# Altium footprint library bs_libs.PcbLib: 125 footprints (part 2 of 8)
Each footprint in its own frame and in the unit in brackets; x right, y up, seen from the top. Pads: shape width x height; smd on the part's side, far side on the other; paste and mask are expansions set on the pad; w line width, h text height; cw(c..) or ccw(c..) is an arc to the next point about the centre after c.
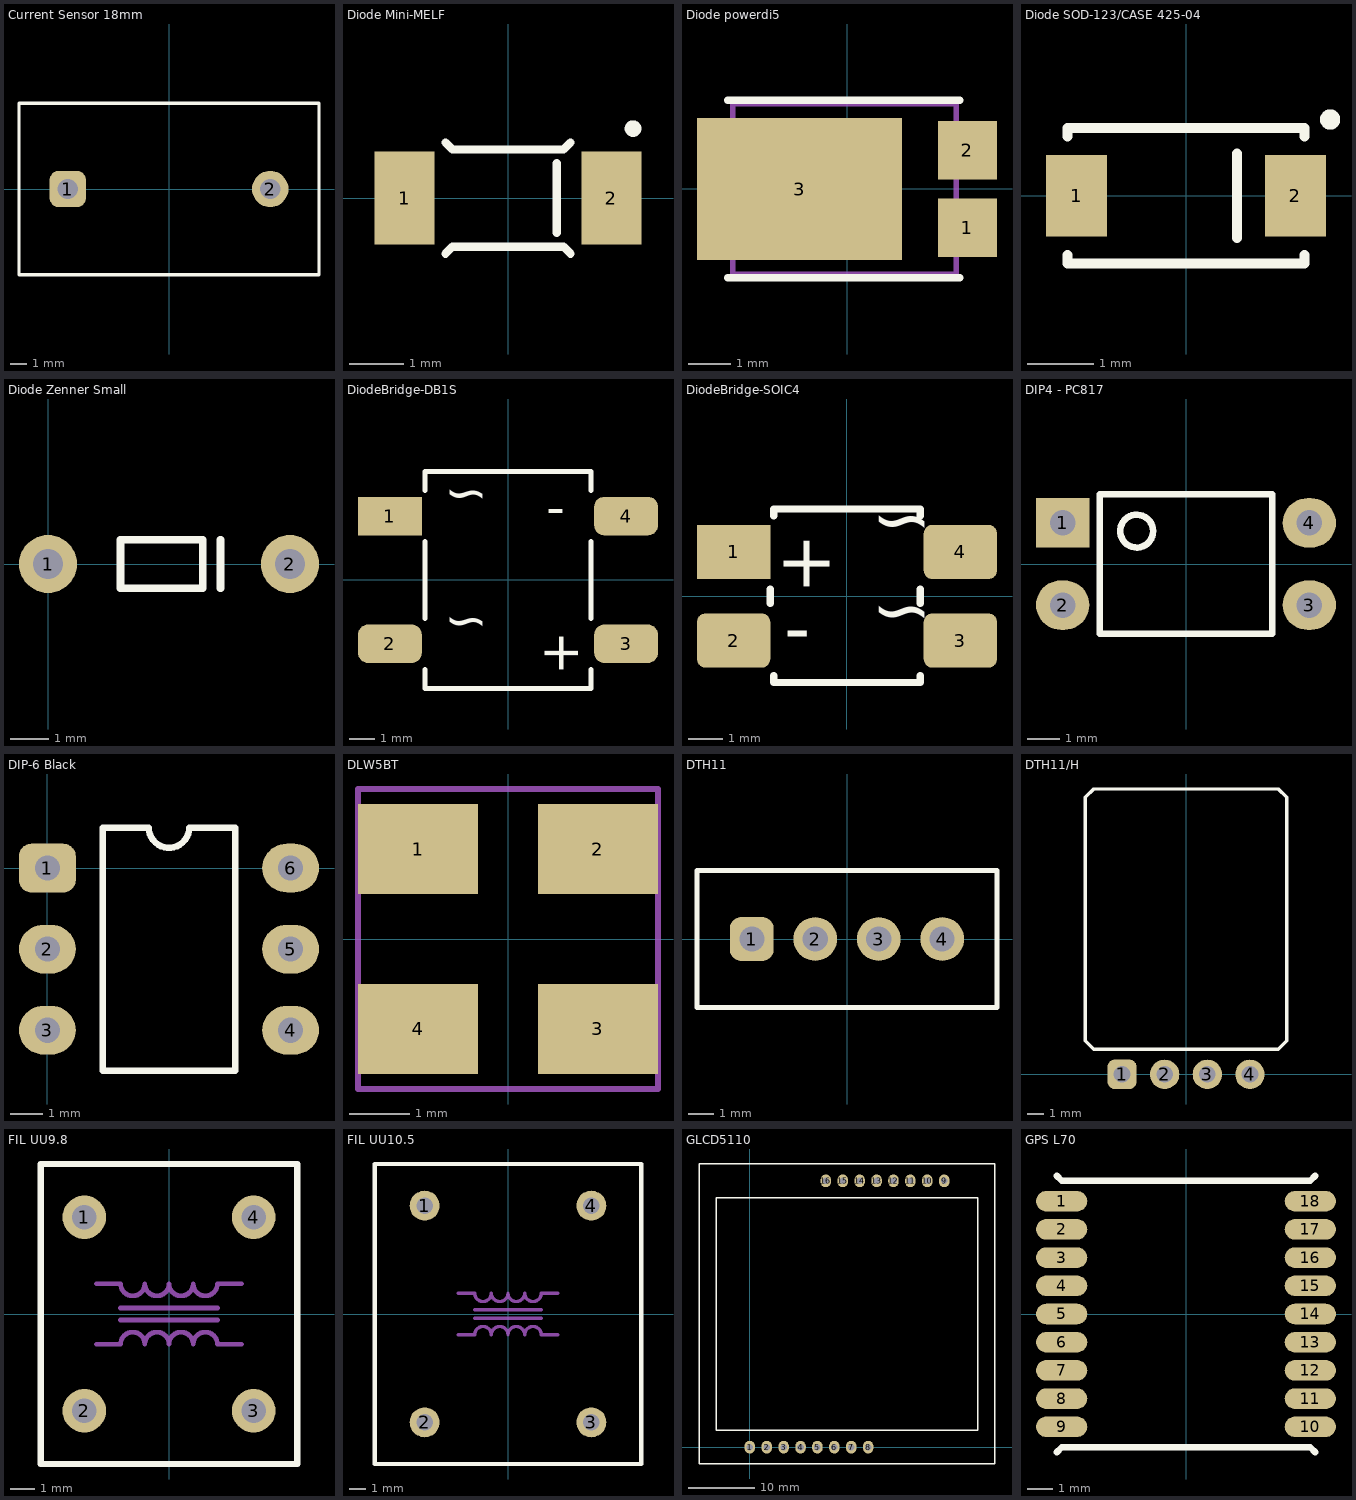
[diagram p1: the footprints below, top view; thin cyan lines are the x and y axes]

## Current Sensor 18mm [mm]
pads (2):
  rrect50% 2.159x2.159 hole 1.2: 1(-6,0)
  round 2.159 hole 1.2: 2(6,0)
Top Overlay:
  lines w0.203: -8.89,-5.08 8.89,-5.08 8.89,5.08 -8.89,5.08 -8.89,-5.08
3D body "Current Sensor - SW3dPS-Molex - 2-Pin Header with Lock (0.100in pitch).STEP.step": height 20.4, standoff -3, extent -8.6,-4.775 8.6,4.765

## Diode Mini-MELF [mil]
pads (2):
  rect 43x67 smd: 1(-74.5,0) 2(74.5,0)
Top Overlay:
  circle w6: c90,50 r3
  lines w6: -45,-40 -40,-35 40,-35 45,-40 ; -45,40 -40,35 40,35 45,40 ; 35,-25 35,25
3D body "User Library-sod80-1-SMD-4148-THUY-TINH.step": height 28.54, standoff -28.54, extent -68.9,-28.55 68.89,28.54

## Diode powerdi5 [mm] "Diodes Inc recommended land pattern, ap02001.pdf rev 60"
height 1.15
pads (3):
  rect 1.4x1.39 smd: 1(2.856,-0.92) 2(2.856,0.92)
  rect 4.86x3.36 smd: 3(-1.126,0)
Top Overlay:
  lines w0.18: -2.825,-2.1 2.675,-2.1 ; -2.825,2.1 2.675,2.1
Mechanical 5:
  lines w0.127: -2.706,-0.94 -2.706,-2.025 2.594,-2.025 2.594,-1.415 ; -2.706,-0.94 -2.706,0.94 ; -2.706,-0.94 -3.356,-0.94 -3.356,-0.5 -3.206,-0.5 -3.206,0.5 -3.356,0.5 -3.356,0.94 -2.706,0.94 ; -2.706,0.94 -2.706,2.025 2.594,2.025 2.594,1.415 ; 2.594,-1.415 2.594,-0.425 ; 2.594,-1.415 3.244,-1.415 3.244,-0.425 2.594,-0.425 ; 2.594,-0.425 2.594,0.425 ; 2.594,0.425 2.594,1.415 ; 2.594,0.425 3.244,0.425 3.244,1.415 2.594,1.415
3D body "PowerDI-5.stp": height 1.17, standoff 0.02, extent -3.35,-2.025 3.25,2.025

## Diode SOD-123/CASE 425-04 [mil]
pads (2):
  rect 36x48 smd: 1(-64.5,0) 2(64.5,0)
Top Overlay:
  circle w6: c85,45 r3
  lines w6: -70,-35 -70,-40 70,-40 70,-35 ; -70,35 -70,40 70,40 70,35 ; 30,-25 30,25
3D body "User Library-SOD-123 CASE 425-04.STEP": height 47.28, standoff 0, extent -64.97,-31.5 64.95,31.49

## Diode Zenner Small [mil]
pads (2):
  round 60 hole 31: 1(0,0) 2(250,0)
Top Overlay:
  lines w8: 178.33,-25 178.33,25 ; 75,-25 75,25 160,25 160,0 160,-25 75,-25

## DiodeBridge-DB1S [mil]
pads (4):
  rect 100x60 smd: 1(-185,100)
  rrect50% 100x60 smd: 2(-185,-100) 3(185,-100) 4(185,100)
Top Overlay:
  lines w8: -130,-140 -130,-170 130,-170 130,-140 ; -130,-60 -130,60 ; -130,140 -130,170 130,170 130,140 ; 130,-60 130,60
  text "+" at 110,-80 h60
  text "-" at 60,130 h60
  text "~" at -100,-40 h60
  text "~" at -100,160 h60
3D body "User Library-SDIP-Diode bridge.step": height 142.91, standoff 0, extent -195.85,-167 197.85,167.65

## DiodeBridge-SOIC4 [mm]
pads (4):
  rect 2.1x1.55 smd: 1(-3.25,1.27)
  rrect30% 2.1x1.55 smd: 2(-3.25,-1.27) 3(3.25,-1.27) 4(3.25,1.27)
Top Overlay:
  lines w0.203: -2.2,-0.2 -2.2,0.2 ; -2.1,-2.275 -2.1,-2.475 2.1,-2.475 2.1,-2.275 ; -2.1,2.3 -2.1,2.5 2.1,2.5 2.1,2.3 ; 2.1,-0.2 2.1,0.2
  text "+" at -0.5,1.8 h1.52
  text "-" at -1.8,-0.5 h1.52
  text "~" at 0.7,0.2 h1.52
  text "~" at 0.7,2.8 h1.52
3D body "User Library-Bridge SMD TO-269AA MB6S.step": height 2.91, standoff 0, extent -3.52,-2.475 3.52,2.475

## DIP4 - PC817 [mil]
pads (4):
  rect 65x60 hole 31: 1(-150,50)
  oval 65x60 hole 31: 2(-150,-50) 3(150,-50) 4(150,50)
Top Overlay:
  circle w8: c-60,40 r20
  lines w8: -105,-85 105,-85 105,85 -105,85 -105,-85
3D body "User Library-DIP4-7_62-2_54.step": height 169.29, standoff -106.3, extent -155.12,-90.36 155.12,90.37

## DIP-6 Black [mil]
pads (6):
  rrect50% 70x60 hole 31: 1(0,0)
  oval 70x60 hole 31: 2(0,-100) 3(0,-200) 4(300,-200) 5(300,-100) 6(300,0)
Top Overlay:
  lines w8: 68,-250 68,50 125,50 ccw(c150,50) 175,50 232,50 232,-250 68,-250
3D body "CircuitWorks-DIP6.step": height 169.69, standoff -129.13, extent -7.48,-258.11 307.48,60

## DLW5BT [mm]
pads (4):
  rect 2x1.5 smd: 1(-1.5,1.5) 2(1.5,1.5) 3(1.5,-1.5) 4(-1.5,-1.5)
Mechanical 1:
  lines w0.1: -2.5,-2.5 2.5,-2.5 2.5,2.5 -2.5,2.5 -2.5,-2.5
3D body: height 2.8, standoff 0, extent -2.5,-2.5 2.5,2.5

## DTH11 [mm] "Temperature and humidity module"
pads (4):
  rrect50% 1.75x1.75 hole 1: 1(-3.81,0)
  round 1.75 hole 1: 2(-1.27,0) 3(1.27,0) 4(3.81,0)
Top Overlay:
  lines w0.2: -6,-2.75 -6,2.75 6,2.75 6,-2.75 -6,-2.75
3D body "User Library-DHT11.step": height 15.75, standoff -7.75, extent -6,-2.75 6,2.75

## DTH11/H [mm] "Temperature and humidity module"
pads (4):
  rrect50% 1.75x1.75 hole 1: 1(-3.81,0)
  round 1.75 hole 1: 2(-1.27,0) 3(1.27,0) 4(3.81,0)
Top Overlay:
  lines w0.2: -6,2 -5.5,1.5 5.5,1.5 6,2 6,16.5 5.5,17 -5.5,17 -6,16.5 -6,2
3D body "User Library-DHT11.step": height 5.5, standoff 0, extent -6,-6.5 6,17

## FIL UU9.8 [mm] "VARISTOR 23V 250A DISC 7MM"
pads (4):
  round 1.8 hole 1: 1(-3.5,4) 2(-3.5,-4) 3(3.5,-4) 4(3.5,4)
Top Overlay:
  lines w0.254: -5.3,-6.2 -5.3,6.2 5.3,6.2 5.3,-6.2 -5.3,-6.2
Mechanical 1:
  lines w0.2: -3,-1.25 -2,-1.25 cw(c-1.5,-1.25) -1,-1.25 cw(c-0.5,-1.25) 0,-1.25 cw(c0.5,-1.25) 1,-1.25 cw(c1.5,-1.25) 2,-1.25 3,-1.25 ; -3,1.25 -2,1.25 ccw(c-1.5,1.25) -1,1.25 ccw(c-0.5,1.25) 0,1.25 ccw(c0.5,1.25) 1,1.25 ccw(c1.5,1.25) 2,1.25 3,1.25 ; -2,-0.25 2,-0.25 ; -2,0.25 2,0.25
3D body "UU9.8.step": height 15.3, standoff -3, extent -5.3,-8.076 5.3,8.081

## FIL UU10.5 [mm] "VARISTOR 23V 250A DISC 7MM"
pads (4):
  round 1.8 hole 1: 1(-5,6.5) 2(-5,-6.5) 3(5,-6.5) 4(5,6.5)
Top Overlay:
  lines w0.254: -8,-9 8,-9 8,9 -8,9 -8,-9
Mechanical 1:
  lines w0.2: -3,-1.25 -2,-1.25 cw(c-1.5,-1.25) -1,-1.25 cw(c-0.5,-1.25) 0,-1.25 cw(c0.5,-1.25) 1,-1.25 cw(c1.5,-1.25) 2,-1.25 3,-1.25 ; -3,1.25 -2,1.25 ccw(c-1.5,1.25) -1,1.25 ccw(c-0.5,1.25) 0,1.25 ccw(c0.5,1.25) 1,1.25 ccw(c1.5,1.25) 2,1.25 3,1.25 ; -2,-0.25 2,-0.25 ; -2,0.25 2,0.25
3D body "UU10.5.step": height 24.48, standoff -1.5, extent -8,-10.903 8,10.891

## GLCD5110 [mil]
pads (16):
  oval 62x75 hole 39: 1(0,0) 2(100,0) 3(200,0) 4(300,0) 5(400,0) 6(500,0) 7(600,0) 8(700,0) 9(1150,1575) 10(1050,1575) 11(950,1575) 12(850,1575) 13(750,1575) 14(650,1575) 15(550,1575) 16(450,1575)
Top Overlay:
  lines w8: -300,-100 1450,-100 1450,1675 -300,1675 -300,-100 ; -200,100 -200,1475 1350,1475 1350,100 -200,100

## GPS L70 [mm]
pads (18):
  oval 2x0.8 smd: 1(-4.85,4.4) 2(-4.85,3.3) 3(-4.85,2.2) 4(-4.85,1.1) 5(-4.85,0) 6(-4.85,-1.1) 7(-4.85,-2.2) 8(-4.85,-3.3) 9(-4.85,-4.4) 10(4.85,-4.4) 11(4.85,-3.3) 12(4.85,-2.2) 13(4.85,-1.1) 14(4.85,0) 15(4.85,1.1) 16(4.85,2.2) 17(4.85,3.3) 18(4.85,4.4)
Top Overlay:
  lines w0.254: -5.05,-5.4 -4.85,-5.2 4.85,-5.2 5.05,-5.4 ; -5.05,5.4 -4.85,5.2 4.85,5.2 5.05,5.4
3D body "User Library-QUECTEL L70.step": height 2.52, standoff 0, extent -4.85,-5.05 4.85,5.05